# Altium footprint library FootPrintLib_1.PcbLib: 498 footprints (part 8 of 35)
Each footprint in its own frame and in the unit in brackets; x right, y up, seen from the top. Pads: shape width x height; smd on the part's side, far side on the other; paste and mask are expansions set on the pad; w line width, h text height; cw(c..) or ccw(c..) is an arc to the next point about the centre after c.
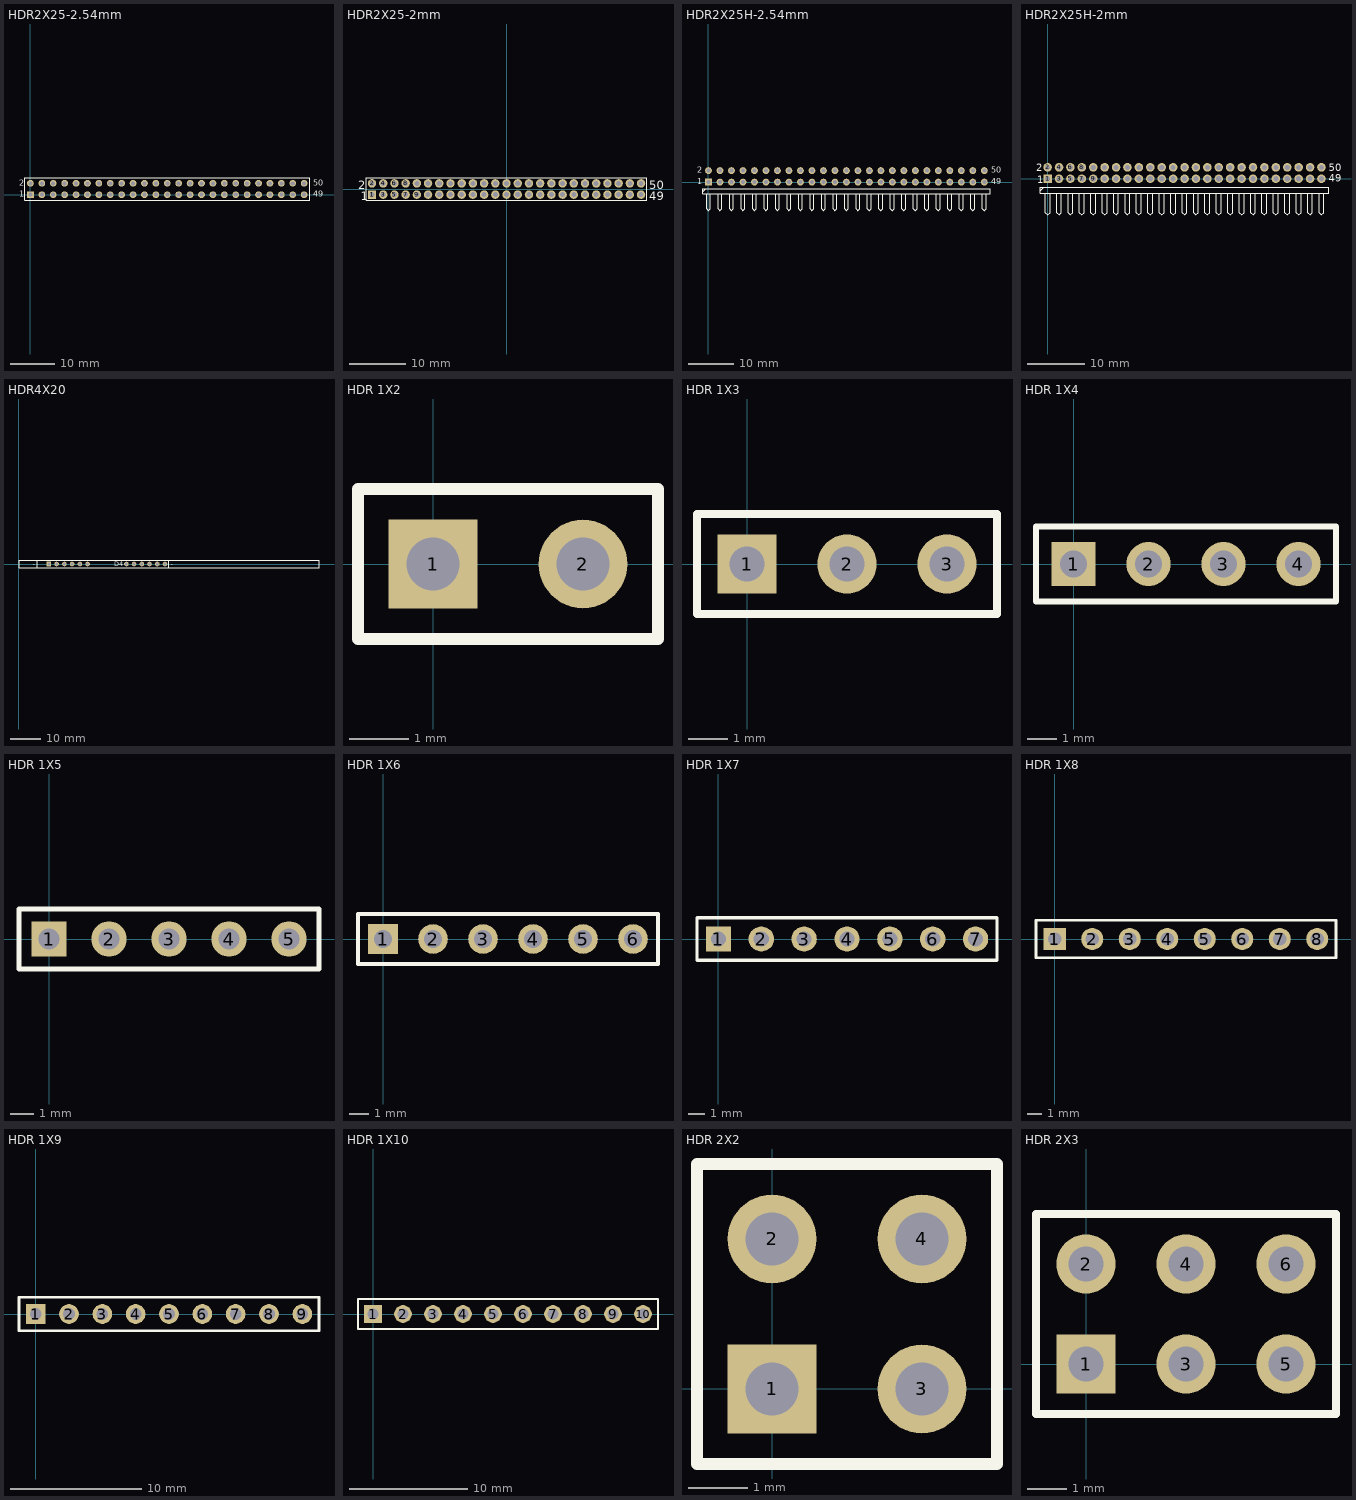
[diagram p7: the footprints below, top view; thin cyan lines are the x and y axes]

## HDR2X25-2.54mm [mm] "Connector; Header; 25x2 Position; 2.54 mm Pitch"
pads (50):
  rect 1.5x1.5 hole 0.9: 1(0,0)
  round 1.5 hole 0.9: 2(0,2.54) 3(2.54,0) 4(2.54,2.54) 5(5.08,0) 6(5.08,2.54) 7(7.62,0) 8(7.62,2.54) 9(10.16,0) 10(10.16,2.54) 11(12.7,0) 12(12.7,2.54) 13(15.24,0) 14(15.24,2.54) 15(17.78,0) 16(17.78,2.54) 17(20.32,0) 18(20.32,2.54) 19(22.86,0) 20(22.86,2.54) 21(25.4,0) 22(25.4,2.54) 23(27.94,0) 24(27.94,2.54) 25(30.48,0) 26(30.48,2.54) 27(33.02,0) 28(33.02,2.54) 29(35.56,0) 30(35.56,2.54) 31(38.1,0) 32(38.1,2.54) 33(40.64,0) 34(40.64,2.54) 35(43.18,0) 36(43.18,2.54) 37(45.72,0) 38(45.72,2.54) 39(48.26,0) 40(48.26,2.54) 41(50.8,0) 42(50.8,2.54) 43(53.34,0) 44(53.34,2.54) 45(55.88,0) 46(55.88,2.54) 47(58.42,0) 48(58.42,2.54) 49(60.96,0) 50(60.96,2.54)
Top Overlay:
  lines w0.2: -1.27,-1.27 -1.27,3.81 62.23,3.81 62.23,-1.27 -1.27,-1.27
  text "2" at -2.54,2.032 h1.27
  text "1" at -2.54,-0.508 h1.27
  text "49" at 62.992,-0.508 h1.27
  text "50" at 62.992,2.032 h1.27

## HDR2X25-2mm [mm] "Connector; Header; 25x2 Position; 2mm Pitch"
pads (50):
  rect 1.5x1.5 hole 0.9: 1(-24,-1)
  round 1.5 hole 0.9: 2(-24,1) 3(-22,-1) 4(-22,1) 5(-20,-1) 6(-20,1) 7(-18,-1) 8(-18,1) 9(-16,-1) 10(-16,1) 11(-14,-1) 12(-14,1) 13(-12,-1) 14(-12,1) 15(-10,-1) 16(-10,1) 17(-8,-1) 18(-8,1) 19(-6,-1) 20(-6,1) 21(-4,-1) 22(-4,1) 23(-2,-1) 24(-2,1) 25(0,-1) 26(0,1) 27(2,-1) 28(2,1) 29(4,-1) 30(4,1) 31(6,-1) 32(6,1) 33(8,-1) 34(8,1) 35(10,-1) 36(10,1) 37(12,-1) 38(12,1) 39(14,-1) 40(14,1) 41(16,-1) 42(16,1) 43(18,-1) 44(18,1) 45(20,-1) 46(20,1) 47(22,-1) 48(22,1) 49(24,-1) 50(24,1)
Top Overlay:
  lines w0.15: -25,-2 -25,2 25,2 25,-2 -25,-2
  text "2" at -26.5,0 h1.52
  text "49" at 25.5,-2 h1.52
  text "50" at 25.5,0 h1.52
  text "1" at -26,-2 h1.52
3D body "Header 2.00 mm Milli-Grid TH vert 50w.stp": height 4.75, standoff -3.35, extent -24.95,-2 24.95,2

## HDR2X25H-2.54mm [mm] "Connector; Header; 25x2 Position; Right Angle;2.54mm Pitch"
pads (50):
  rect 1.5x1.5 hole 0.9: 1(0,0)
  round 1.5 hole 0.9: 2(0,2.54) 3(2.54,0) 4(2.54,2.54) 5(5.08,0) 6(5.08,2.54) 7(7.62,0) 8(7.62,2.54) 9(10.16,0) 10(10.16,2.54) 11(12.7,0) 12(12.7,2.54) 13(15.24,0) 14(15.24,2.54) 15(17.78,0) 16(17.78,2.54) 17(20.32,0) 18(20.32,2.54) 19(22.86,0) 20(22.86,2.54) 21(25.4,0) 22(25.4,2.54) 23(27.94,0) 24(27.94,2.54) 25(30.48,0) 26(30.48,2.54) 27(33.02,0) 28(33.02,2.54) 29(35.56,0) 30(35.56,2.54) 31(38.1,0) 32(38.1,2.54) 33(40.64,0) 34(40.64,2.54) 35(43.18,0) 36(43.18,2.54) 37(45.72,0) 38(45.72,2.54) 39(48.26,0) 40(48.26,2.54) 41(50.8,0) 42(50.8,2.54) 43(53.34,0) 44(53.34,2.54) 45(55.88,0) 46(55.88,2.54) 47(58.42,0) 48(58.42,2.54) 49(60.96,0) 50(60.96,2.54)
Top Overlay:
  lines w0.2: -1.27,-2.117 -0.635,-1.482 ; -0.423,-2.54 -0.423,-5.927 0,-6.35 0.423,-5.927 0.423,-2.54 ; 2.117,-2.54 2.117,-5.927 2.54,-6.35 2.963,-5.927 2.963,-2.54 ; 4.657,-2.54 4.657,-5.927 5.08,-6.35 5.503,-5.927 5.503,-2.54 ; 7.197,-2.54 7.197,-5.927 7.62,-6.35 8.043,-5.927 8.043,-2.54 ; 9.737,-2.54 9.737,-5.927 10.16,-6.35 10.583,-5.927 10.583,-2.54 ; 12.277,-2.54 12.277,-5.927 12.7,-6.35 13.123,-5.927 13.123,-2.54 ; 14.817,-2.54 14.817,-5.927 15.24,-6.35 15.663,-5.927 15.663,-2.54 ; 17.357,-2.54 17.357,-5.927 17.78,-6.35 18.203,-5.927 18.203,-2.54 ; 19.897,-2.54 19.897,-5.927 20.32,-6.35 20.743,-5.927 20.743,-2.54 ; 22.437,-2.54 22.437,-5.927 22.86,-6.35 23.283,-5.927 23.283,-2.54 ; 24.977,-2.54 24.977,-5.927 25.4,-6.35 25.823,-5.927 25.823,-2.54 ; 27.517,-2.54 27.517,-5.927 27.94,-6.35 28.363,-5.927 28.363,-2.54 ; 30.057,-2.54 30.057,-5.927 30.48,-6.35 30.903,-5.927 30.903,-2.54 ; 32.597,-2.54 32.597,-5.927 33.02,-6.35 33.443,-5.927 33.443,-2.54 ; 35.137,-2.54 35.137,-5.927 35.56,-6.35 35.983,-5.927 35.983,-2.54 ; 37.677,-2.54 37.677,-5.927 38.1,-6.35 38.523,-5.927 38.523,-2.54 ; 40.217,-2.54 40.217,-5.927 40.64,-6.35 41.063,-5.927 41.063,-2.54 ; 42.757,-2.54 42.757,-5.927 43.18,-6.35 43.603,-5.927 43.603,-2.54 ; 45.297,-2.54 45.297,-5.927 45.72,-6.35 46.143,-5.927 46.143,-2.54 ; 47.837,-2.54 47.837,-5.927 48.26,-6.35 48.683,-5.927 48.683,-2.54 ; 50.377,-2.54 50.377,-5.927 50.8,-6.35 51.223,-5.927 51.223,-2.54 ; 52.917,-2.54 52.917,-5.927 53.34,-6.35 53.763,-5.927 53.763,-2.54 ; 55.457,-2.54 55.457,-5.927 55.88,-6.35 56.303,-5.927 56.303,-2.54 ; 57.997,-2.54 57.997,-5.927 58.42,-6.35 58.843,-5.927 58.843,-2.54 ; 60.537,-2.54 60.537,-5.927 60.96,-6.35 61.383,-5.927 61.383,-2.54 ; -1.27,-2.54 -1.27,-1.482 62.23,-1.482 62.23,-2.54 -1.27,-2.54
  text "2" at -2.54,2.032 h1.27
  text "1" at -2.54,-0.508 h1.27
  text "49" at 62.484,-0.508 h1.27
  text "50" at 62.484,2.032 h1.27

## HDR2X25H-2mm [mm] "Connector; Header; 25x2 Position; Right Angle; 2 mm Pitch"
pads (50):
  rect 1.5x1.5 hole 0.9: 1(0,0)
  round 1.5 hole 0.9: 2(0,2) 3(2,0) 4(2,2) 5(4,0) 6(4,2) 7(6,0) 8(6,2) 9(8,0) 10(8,2) 11(10,0) 12(10,2) 13(12,0) 14(12,2) 15(14,0) 16(14,2) 17(16,0) 18(16,2) 19(18,0) 20(18,2) 21(20,0) 22(20,2) 23(22,0) 24(22,2) 25(24,0) 26(24,2) 27(26,0) 28(26,2) 29(28,0) 30(28,2) 31(30,0) 32(30,2) 33(32,0) 34(32,2) 35(34,0) 36(34,2) 37(36,0) 38(36,2) 39(38,0) 40(38,2) 41(40,0) 42(40,2) 43(42,0) 44(42,2) 45(44,0) 46(44,2) 47(46,0) 48(46,2) 49(48,0) 50(48,2)
Top Overlay:
  lines w0.2: -1.27,-2.117 -0.635,-1.482 ; -0.423,-2.54 -0.423,-5.927 0,-6.35 0.423,-5.927 0.423,-2.54 ; 1.577,-2.54 1.577,-5.927 2,-6.35 2.423,-5.927 2.423,-2.54 ; 3.577,-2.54 3.577,-5.927 4,-6.35 4.423,-5.927 4.423,-2.54 ; 5.577,-2.54 5.577,-5.927 6,-6.35 6.423,-5.927 6.423,-2.54 ; 7.577,-2.54 7.577,-5.927 8,-6.35 8.423,-5.927 8.423,-2.54 ; 9.577,-2.54 9.577,-5.927 10,-6.35 10.423,-5.927 10.423,-2.54 ; 11.577,-2.54 11.577,-5.927 12,-6.35 12.423,-5.927 12.423,-2.54 ; 13.577,-2.54 13.577,-5.927 14,-6.35 14.423,-5.927 14.423,-2.54 ; 15.577,-2.54 15.577,-5.927 16,-6.35 16.423,-5.927 16.423,-2.54 ; 17.577,-2.54 17.577,-5.927 18,-6.35 18.423,-5.927 18.423,-2.54 ; 19.577,-2.54 19.577,-5.927 20,-6.35 20.423,-5.927 20.423,-2.54 ; 21.577,-2.54 21.577,-5.927 22,-6.35 22.423,-5.927 22.423,-2.54 ; 23.577,-2.54 23.577,-5.927 24,-6.35 24.423,-5.927 24.423,-2.54 ; 25.577,-2.54 25.577,-5.927 26,-6.35 26.423,-5.927 26.423,-2.54 ; 27.577,-2.54 27.577,-5.927 28,-6.35 28.423,-5.927 28.423,-2.54 ; 29.577,-2.54 29.577,-5.927 30,-6.35 30.423,-5.927 30.423,-2.54 ; 31.577,-2.54 31.577,-5.927 32,-6.35 32.423,-5.927 32.423,-2.54 ; 33.577,-2.54 33.577,-5.927 34,-6.35 34.423,-5.927 34.423,-2.54 ; 35.577,-2.54 35.577,-5.927 36,-6.35 36.423,-5.927 36.423,-2.54 ; 37.577,-2.54 37.577,-5.927 38,-6.35 38.423,-5.927 38.423,-2.54 ; 39.577,-2.54 39.577,-5.927 40,-6.35 40.423,-5.927 40.423,-2.54 ; 41.577,-2.54 41.577,-5.927 42,-6.35 42.423,-5.927 42.423,-2.54 ; 43.577,-2.54 43.577,-5.927 44,-6.35 44.423,-5.927 44.423,-2.54 ; 45.577,-2.54 45.577,-5.927 46,-6.35 46.423,-5.927 46.423,-2.54 ; 47.577,-2.54 47.577,-5.927 48,-6.35 48.423,-5.927 48.423,-2.54 ; -1.27,-2.54 49.27,-2.54 49.27,-1.482 -1.27,-1.482 -1.27,-2.54
  text "50" at 49.276,1.27 h1.27
  text "49" at 49.276,-0.508 h1.27
  text "1" at -1.778,-0.762 h1.27
  text "2" at -2.032,1.27 h1.27

## HDR4X20 [mm] "LCD; Connector; Header; 16 Position"
pads (12):
  rect 1.5x1.5 hole 0.9: 1(9.906,0)
  round 1.5 hole 0.9: 2(12.446,0) 3(14.986,0) 4(17.526,0) 5(20.066,0) 6(22.606,0) 11(35.306,0) 12(37.846,0) 13(40.386,0) 14(42.926,0) 15(45.466,0) 16(48.006,0)
Top Overlay:
  lines w0.2: 46.736,1.27 98.552,1.27 98.552,-1.27 46.736,-1.27 6.096,-1.27 ; 49.276,-1.27 49.276,1.27 6.096,1.27 ; 6.096,-1.27 6.096,1.27 ; 6.096,-1.27 0.096,-1.27 0.096,1.27 6.096,1.27
  text "D4" at 31.369,-0.762 h1.52
  text "-" at 49.911,-0.762 h1.52
  text "-" at 4.572,-0.762 h1.52

## HDR 1X2 [mm] "Connector; Header; 2 Position"
height 1.75
pads (2):
  rect 1.5x1.5 hole 0.9: 1(0,0)
  round 1.5 hole 0.9: 2(2.54,0)
Top Overlay:
  lines w0.2: -1.27,-1.27 -1.27,1.27 3.81,1.27 3.81,-1.27 -1.27,-1.27
3D body "header 2.STEP": height 8.51, standoff -3.68, extent -1.26,-1.27 3.81,1.26

## HDR 1X3 [mm] "Connector; Header; 3 Position"
height 1.75
pads (3):
  rect 1.5x1.5 hole 0.9: 1(0,0)
  round 1.5 hole 0.9: 2(2.54,0) 3(5.08,0)
Top Overlay:
  lines w0.2: -1.27,-1.27 -1.27,1.27 6.35,1.27 6.35,-1.27 -1.27,-1.27
3D body "header 3.STEP": height 8.51, standoff -3.68, extent -1.26,-1.27 6.35,1.26

## HDR 1X4 [mm] "Connector; Header; 4 Position"
height 1.75
pads (4):
  rect 1.5x1.5 hole 0.9: 1(0,0)
  round 1.5 hole 0.9: 2(2.54,0) 3(5.08,0) 4(7.62,0)
Top Overlay:
  lines w0.2: -1.27,-1.27 -1.27,1.27 8.89,1.27 8.89,-1.27 -1.27,-1.27
3D body "header 4.STEP": height 8.51, standoff -3.68, extent -1.26,-1.27 8.89,1.26

## HDR 1X5 [mm] "Connector; Header; 5 Position"
height 1.75
pads (5):
  rect 1.5x1.5 hole 0.9: 1(0,0)
  round 1.5 hole 0.9: 2(2.54,0) 3(5.08,0) 4(7.62,0) 5(10.16,0)
Top Overlay:
  lines w0.2: -1.27,-1.27 -1.27,1.27 11.43,1.27 11.43,-1.27 -1.27,-1.27
3D body "header 5.STEP": height 8.51, standoff -3.68, extent -1.26,-1.27 11.43,1.26

## HDR 1X6 [mm] "Connector; Header; 6 Position"
height 1.75
pads (6):
  rect 1.5x1.5 hole 0.9: 1(0,0)
  round 1.5 hole 0.9: 2(2.54,0) 3(5.08,0) 4(7.62,0) 5(10.16,0) 6(12.7,0)
Top Overlay:
  lines w0.2: -1.27,-1.27 -1.27,1.27 13.97,1.27 13.97,-1.27 -1.27,-1.27
3D body "header 6.STEP": height 8.51, standoff -3.68, extent -1.26,-1.27 13.97,1.26

## HDR 1X7 [mm] "Connector; Header; 7 Position"
height 1.75
pads (7):
  rect 1.5x1.5 hole 0.9: 1(0,0)
  round 1.5 hole 0.9: 2(2.54,0) 3(5.08,0) 4(7.62,0) 5(10.16,0) 6(12.7,0) 7(15.24,0)
Top Overlay:
  lines w0.2: -1.27,-1.27 16.51,-1.27 16.51,1.27 -1.27,1.27 -1.27,-1.27
3D body "header 7.STEP": height 8.51, standoff -3.68, extent -1.26,-1.27 16.51,1.26

## HDR 1X8 [mm] "Connector; Header; 8 Position"
height 1.75
pads (8):
  rect 1.5x1.5 hole 0.9: 1(0,0)
  round 1.5 hole 0.9: 2(2.54,0) 3(5.08,0) 4(7.62,0) 5(10.16,0) 6(12.7,0) 7(15.24,0) 8(17.78,0)
Top Overlay:
  lines w0.2: -1.27,-1.27 19.05,-1.27 19.05,1.27 -1.27,1.27 -1.27,-1.27
3D body "header 8.STEP": height 8.51, standoff -3.68, extent -1.26,-1.27 19.05,1.26

## HDR 1X9 [mm] "Connector; Header; 9 Position"
height 1.75
pads (9):
  rect 1.5x1.5 hole 0.9: 1(0,0)
  round 1.5 hole 0.9: 2(2.54,0) 3(5.08,0) 4(7.62,0) 5(10.16,0) 6(12.7,0) 7(15.24,0) 8(17.78,0) 9(20.32,0)
Top Overlay:
  lines w0.2: -1.27,-1.27 -1.27,1.27 21.59,1.27 21.59,-1.27 -1.27,-1.27
3D body "header 9.STEP": height 8.51, standoff -3.68, extent -1.26,-1.27 21.59,1.26

## HDR 1X10 [mm] "Connector; Header; 10 Position"
height 1.75
pads (10):
  rect 1.5x1.5 hole 0.9: 1(0,0)
  round 1.5 hole 0.9: 2(2.54,0) 3(5.08,0) 4(7.62,0) 5(10.16,0) 6(12.7,0) 7(15.24,0) 8(17.78,0) 9(20.32,0) 10(22.86,0)
Top Overlay:
  lines w0.2: -1.27,-1.27 -1.27,1.27 24.13,1.27 24.13,-1.27 -1.27,-1.27
3D body "header 10.STEP": height 8.51, standoff -3.68, extent -1.26,-1.27 24.13,1.26

## HDR 2X2 [mm] "Connector; Header; 2x2 Position"
height 1.75
pads (4):
  rect 1.5x1.5 hole 0.9: 1(0,0)
  round 1.5 hole 0.9: 2(0,2.54) 3(2.54,0) 4(2.54,2.54)
Top Overlay:
  lines w0.2: -1.27,-1.27 3.81,-1.27 3.81,3.81 -1.27,3.81 -1.27,-1.27
3D body "header 2X2.STEP": height 8.51, standoff -3.68, extent -1.27,-1.27 3.81,3.81

## HDR 2X3 [mm] "Connector; Header; 2x3 Position"
height 1.75
pads (6):
  rect 1.5x1.5 hole 0.9: 1(0,0)
  round 1.5 hole 0.9: 2(0,2.54) 3(2.54,0) 4(2.54,2.54) 5(5.08,0) 6(5.08,2.54)
Top Overlay:
  lines w0.2: -1.27,-1.27 6.35,-1.27 6.35,3.81 -1.27,3.81 -1.27,-1.27
3D body "header 2X3.STEP": height 8.51, standoff -3.68, extent -1.27,-1.27 6.35,3.81